# Altium footprint library TIE_2019.PcbLib: 13 footprints
Each footprint in its own frame and in the unit in brackets; x right, y up, seen from the top. Pads: shape width x height; smd on the part's side, far side on the other; paste and mask are expansions set on the pad; w line width, h text height; cw(c..) or ccw(c..) is an arc to the next point about the centre after c.
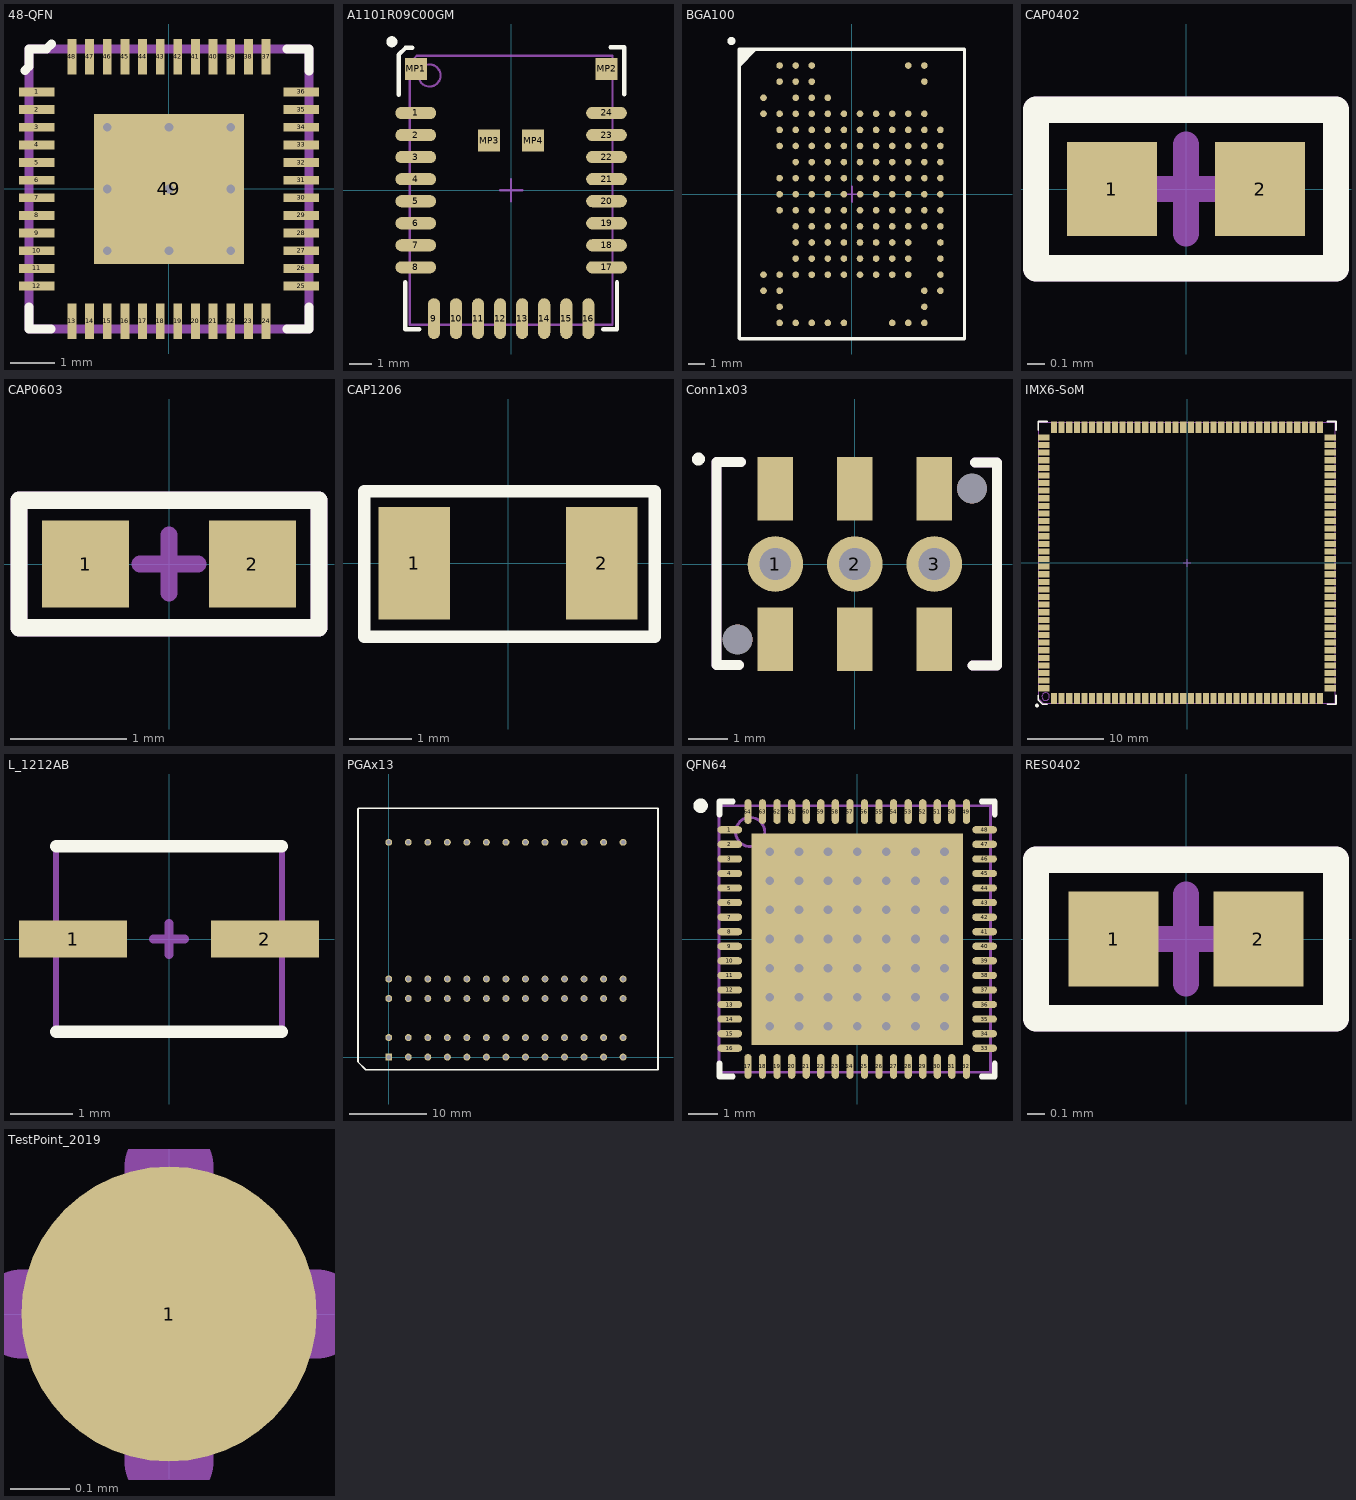
[diagram p0: the footprints below, top view; thin cyan lines are the x and y axes]

## 48-QFN [mm] "6x6mm QFN Package"
pads (49):
  rect 0.8x0.2 smd mask+0.05: 1(-3,2.2) 2(-3,1.8) 3(-3,1.4) 4(-3,1) 5(-3,0.6) 6(-3,0.2) 7(-3,-0.2) 8(-3,-0.6) 9(-3,-1) 10(-3,-1.4) 11(-3,-1.8) 12(-3,-2.2) 25(3,-2.2) 26(3,-1.8) 27(3,-1.4) 28(3,-1) 29(3,-0.6) 30(3,-0.2) 31(3,0.2) 32(3,0.6) 33(3,1) 34(3,1.4) 35(3,1.8) 36(3,2.2)
  rect 0.2x0.8 smd mask+0.05: 13(-2.2,-3) 14(-1.8,-3) 15(-1.4,-3) 16(-1,-3) 17(-0.6,-3) 18(-0.2,-3) 19(0.2,-3) 20(0.6,-3) 21(1,-3) 22(1.4,-3) 23(1.8,-3) 24(2.2,-3) 37(2.2,3) 38(1.8,3) 39(1.4,3) 40(1,3) 41(0.6,3) 42(0.2,3) 43(-0.2,3) 44(-0.6,3) 45(-1,3) 46(-1.4,3) 47(-1.8,3) 48(-2.2,3)
  rect 3.4x3.4 smd paste-10 mask+0.05: 49(0,0)
via 0,0 diameter 0.4 hole 0.2
via -1.4,1.4 diameter 0.4 hole 0.2
via 0,1.4 diameter 0.4 hole 0.2
via 1.4,1.4 diameter 0.4 hole 0.2
via 1.4,0 diameter 0.4 hole 0.2
via -1.4,0 diameter 0.4 hole 0.2
via -1.4,-1.4 diameter 0.4 hole 0.2
via 0,-1.4 diameter 0.4 hole 0.2
via 1.4,-1.4 diameter 0.4 hole 0.2
Top Overlay:
  lines w0.2: -3.261,2.69 -3.175,2.776 -3.175,3.175 -2.776,3.175 -2.661,3.29 ; -3.175,-2.675 -3.175,-3.175 -2.675,-3.175 ; 2.675,-3.175 3.175,-3.175 3.175,-2.675 ; 2.675,3.175 3.175,3.175 3.175,2.675
Top Paste:
  region: 1.55,-0.15 0.15,-0.15 0.15,-1.55 1.55,-1.55
  region: 1.55,1.55 0.15,1.55 0.15,0.15 1.55,0.15
  rectangle: -1.55,0.15 -0.15,1.55
  rectangle: -1.55,-1.55 -0.15,-0.15
Top Assembly:
  text ".Designator" at -2.5,-0.155 h0.5
Mechanical 10:
  lines w0.2: -3.175,-3.175 3.175,-3.175 3.175,3.175 -3.175,3.175 -3.175,-3.175
Mechanical 1(UNUSED):
  lines w0.15: -0.25,0 0.25,0 ; 0,-0.25 0,0.25
3D body "VSC8531XMW-01.stp": height 0.9, standoff 0, extent -3.05,-3.05 3.05,3.05

## A1101R09C00GM [mm] "Sub-GHz Modules 900MHz Radio Only Connector"
height 2.1
pads (28):
  oval 1.85x0.55 smd: 1(-4.325,3.5) 2(-4.325,2.5) 3(-4.325,1.5) 4(-4.325,0.5) 5(-4.325,-0.5) 6(-4.325,-1.5) 7(-4.325,-2.5) 8(-4.325,-3.5) 17(4.325,-3.5) 18(4.325,-2.5) 19(4.325,-1.5) 20(4.325,-0.5) 21(4.325,0.5) 22(4.325,1.5) 23(4.325,2.5) 24(4.325,3.5)
  oval 0.55x1.85 smd: 9(-3.5,-5.825) 10(-2.5,-5.825) 11(-1.5,-5.825) 12(-0.5,-5.825) 13(0.5,-5.825) 14(1.5,-5.825) 15(2.5,-5.825) 16(3.5,-5.825)
  rect 1x1 smd: MP1(-4.325,5.5) MP2(4.325,5.5) MP3(-1,2.25) MP4(1,2.25)
Top Overlay:
  circle w0.25: c-5.41,6.731 r0.125
  lines w0.2: -5.105,4.327 -5.105,6.14 -4.792,6.452 -4.48,6.452 ; -4.8,-4.175 -4.8,-6.3 -4.175,-6.3 ; 4.175,-6.3 4.8,-6.3 4.8,-4.175 ; 4.505,6.478 5.13,6.478 5.13,4.353
Top Component Center:
  lines w0.1: -0.5,0 0.5,0 ; 0,-0.5 0,0.5
Top Assembly:
  circle w0.1: c-3.7,5.2 r0.5
  lines w0.1: -4.6,-6.1 -4.6,5.787 -4.287,6.1 4.6,6.1 4.6,-6.1 -4.6,-6.1
  text ".Designator" at -2.5,-0.155 h0.5
3D body: height 2.1, standoff 0, extent -4.6,-6.1 4.6,6.1

## BGA100 [mm] "BGA, 100-Leads, Body 14.00x18.00mmx1.40mm, Pitch 1.00mm"
height 1.4
pads (142):
  round 0.41 smd: A1(-4.5,8) A2(-3.5,8) A3(-2.5,8) A9(3.5,8) A10(4.5,8) B1(-4.5,7) B2(-3.5,7) B3(-2.5,7) B10(4.5,7) C0(-5.5,6) C2(-3.5,6) C3(-2.5,6) C4(-1.5,6) D0(-5.5,5) D1(-4.5,5) D2(-3.5,5) D3(-2.5,5) D4(-1.5,5) D5(-0.5,5) D6(0.5,5) D7(1.5,5) D8(2.5,5) D9(3.5,5) D10(4.5,5) E1(-4.5,4) E2(-3.5,4) E3(-2.5,4) E4(-1.5,4) E5(-0.5,4) E6(0.5,4) E7(1.5,4) E8(2.5,4) E9(3.5,4) E10(4.5,4) E11(5.5,4) F1(-4.5,3) F2(-3.5,3) F3(-2.5,3) F4(-1.5,3) F5(-0.5,3) F6(0.5,3) F7(1.5,3) F8(2.5,3) F9(3.5,3) F10(4.5,3) F11(5.5,3) G2(-3.5,2) G3(-2.5,2) G4(-1.5,2) G5(-0.5,2) G6(0.5,2) G7(1.5,2) G8(2.5,2) G9(3.5,2) G10(4.5,2) G11(5.5,2) H1(-4.5,1) H2(-3.5,1) H3(-2.5,1) H4(-1.5,1) H5(-0.5,1) H6(0.5,1) H7(1.5,1) H8(2.5,1) H9(3.5,1) H10(4.5,1) H11(5.5,1) J1(-4.5,0) J2(-3.5,0) J3(-2.5,0) J4(-1.5,0) J5(-0.5,0) J6(0.508,0) J7(1.5,0) J8(2.5,0) J9(3.5,0) J10(4.5,0) J11(5.5,0) K1(-4.5,-1) K2(-3.5,-1) K3(-2.5,-1) K4(-1.5,-1) K5(-0.5,-1) K6(0.5,-1) K7(1.5,-1) K8(2.5,-1) K9(3.5,-1) K10(4.5,-1) K11(5.5,-1) L2(-3.5,-2) L3(-2.5,-2) L4(-1.5,-2) L5(-0.5,-2) L6(0.5,-2) L7(1.5,-2) L8(2.5,-2) L9(3.5,-2) L10(4.5,-2) L11(5.5,-2) M2(-3.5,-3) M3(-2.5,-3) M4(-1.5,-3) M5(-0.5,-3) M6(0.5,-3) M7(1.5,-3) M8(2.5,-3) M9(3.5,-3) M11(5.5,-3) N2(-3.5,-4) N3(-2.5,-4) N4(-1.5,-4) N5(-0.5,-4) N6(0.5,-4) N7(1.5,-4) N8(2.5,-4) N9(3.5,-4) N11(5.5,-4) P0(-5.5,-5) P1(-4.5,-5) P2(-3.5,-5) P3(-2.5,-5) P4(-1.5,-5) P5(-0.5,-5) P6(0.5,-5) P7(1.5,-5) P8(2.5,-5) P9(3.5,-5) P11(5.5,-5) R0(-5.5,-6) R1(-4.5,-6) R10(4.5,-6) R11(5.5,-6) T1(-4.5,-7) T10(4.5,-7) U1(-4.5,-8) U2(-3.5,-8) U3(-2.5,-8) U4(-1.5,-8) U5(-0.5,-8) U8(2.5,-8) U9(3.5,-8) U10(4.5,-8)
Top Overlay:
  circle w0.25: c-7.493,9.525 r0.125
  region: -6,9 -7,8 -7,9
  lines w0.2: -7,8 -6,9 ; -7.007,-8.971 -7.007,9.029 6.993,9.029 6.993,-8.971 -7.007,-8.971 ; -7,-9 -7,9 7,9 7,-9 -7,-9
Top Component Center:
  lines w0.1: -0.5,0 0.5,0 ; 0,-0.5 0,0.5
Top Assembly:
  lines w0.1: -7,-9 -7,9 7,9 7,-9 -7,-9
  text ".Designator" at -2.474,-0.13 h0.5
3D body: height 1.4, standoff 0.25, extent -7,-9 7,9

## CAP0402 [mm]
pads (2):
  rect 0.51x0.535 smd mask+0.05: 1(-0.42,0) 2(0.42,0)
Top Overlay:
  lines w0.15: -0.85,-0.45 0.85,-0.45 0.85,0.45 -0.85,0.45 -0.85,-0.45
Top Component Center:
  lines w0.15: -0.25,0 0.25,0 ; 0,-0.25 0,0.25
Top Assembly:
  lines w0.15: -0.85,-0.45 0.85,-0.45 0.85,0.45 -0.85,0.45 -0.85,-0.45
  text ".Designator" at -0.569,-0.257 h0.5
3D body "Ceramic_Capacitor_0402_h20mil.step": height 0.51, standoff 0, extent -0.508,-0.254 0.508,0.254

## CAP0603 [mm]
pads (2):
  rect 0.75x0.75 smd mask+0.05: 1(-0.72,0) 2(0.72,0)
Top Overlay:
  lines w0.15: -1.295,-0.55 -1.295,0.55 1.295,0.55 1.295,-0.55 -1.295,-0.55
Top Component Center:
  lines w0.15: -0.25,0 0.25,0 ; 0,-0.25 0,0.25
Top Assembly:
  lines w0.15: -1.295,-0.55 1.295,-0.55 1.295,0.55 -1.295,0.55 -1.295,-0.55
3D body "Ceramic_Capacitor_0603_h32mil.step": height 0.8, standoff 0, extent -0.8,-0.4 0.8,0.4

## CAP1206 [mm]
pads (2):
  rect 1.15x1.8 smd: 1(-1.5,0) 2(1.5,0)
Top Overlay:
  lines w0.2: -2.3,-1.175 2.35,-1.175 2.35,1.15 -2.3,1.15 -2.3,-1.175
3D body "C1206C104K5RALTU.stp": height 0.88, standoff 0, extent -1.7,-0.9 1.7,0.9

## Conn1x03 [mm]
pads (11):
  round 1.4 hole 0.8: 1(-2,0) 2(0,0) 3(2,0)
  round 0.75 hole 0.75 mask-0.5: ""(-2.95,-1.9) ""(2.95,1.9)
  rect 0.9x1.6 smd mask+0.05: ""(-2,-1.9) ""(-2,1.9) ""(0,-1.9) ""(0,1.9) ""(2,-1.9) ""(2,1.9)
Top Overlay:
  circle w0.254: c-3.937,2.642 r0.036
  lines w0.254: -3.48,-2.54 -2.921,-2.54 -3.48,-2.54 ; -3.48,-2.54 -3.48,2.565 ; -3.48,-2.54 -3.48,2.565 ; -3.48,2.565 -2.87,2.565 -3.48,2.565 ; 3.581,-2.553 3.581,2.553 ; 3.581,-2.553 2.972,-2.553 3.581,-2.553 ; 3.581,-2.553 3.581,2.553 ; 3.581,2.553 3.023,2.553 3.581,2.553
Top Assembly:
  lines w0.254: -2.921,-2.54 -3.48,-2.54 -3.48,2.565 -2.87,2.565 ; 3.581,-2.553 2.972,-2.553 3.581,-2.553 ; 3.581,-2.553 3.581,2.553 ; 3.581,-2.553 3.581,2.553 ; 3.581,2.553 3.023,2.553 3.581,2.553
3D body "c-2315312-1-b-3d.stp": height 5.2, standoff -1.9, extent -3.25,-2.4 3.25,2.4

## IMX6-SoM [mm]
height 3
pads (140):
  rect 0.8x1.5 smd: 1(-17.5,-17.85) 2(-16.5,-17.85) 3(-15.5,-17.85) 4(-14.5,-17.85) 5(-13.5,-17.85) 6(-12.5,-17.85) 7(-11.5,-17.85) 8(-10.5,-17.85) 9(-9.5,-17.85) 10(-8.5,-17.85) 11(-7.5,-17.85) 12(-6.5,-17.85) 13(-5.5,-17.85) 14(-4.5,-17.85) 15(-3.5,-17.85) 16(-2.5,-17.85) 17(-1.5,-17.85) 18(-0.5,-17.85) 19(0.5,-17.85) 20(1.5,-17.85) 21(2.5,-17.85) 22(3.5,-17.85) 23(4.5,-17.85) 24(5.5,-17.85) 25(6.5,-17.85) 26(7.5,-17.85) 27(8.5,-17.85) 28(9.5,-17.85) 29(10.5,-17.85) 30(11.5,-17.85) 31(12.5,-17.85) 32(13.5,-17.85) 33(14.5,-17.85) 34(15.5,-17.85) 35(16.5,-17.85) 36(17.5,-17.85) 71(17.5,17.85) 72(16.5,17.85) 73(15.5,17.85) 74(14.5,17.85) 75(13.5,17.85) 76(12.5,17.85) 77(11.5,17.85) 78(10.5,17.85) 79(9.5,17.85) 80(8.5,17.85) 81(7.5,17.85) 82(6.5,17.85) 83(5.5,17.85) 84(4.5,17.85) 85(3.5,17.85) 86(2.5,17.85) 87(1.5,17.85) 88(0.5,17.85) 89(-0.5,17.85) 90(-1.5,17.85) 91(-2.5,17.85) 92(-3.5,17.85) 93(-4.5,17.85) 94(-5.5,17.85) 95(-6.5,17.85) 96(-7.5,17.85) 97(-8.5,17.85) 98(-9.5,17.85) 99(-10.5,17.85) 100(-11.5,17.85) 101(-12.5,17.85) 102(-13.5,17.85) 103(-14.5,17.85) 104(-15.5,17.85) 105(-16.5,17.85) 106(-17.5,17.85)
  rect 1.5x0.8 smd: 37(18.85,-16.5) 38(18.85,-15.5) 39(18.85,-14.5) 40(18.85,-13.5) 41(18.85,-12.5) 42(18.85,-11.5) 43(18.85,-10.5) 44(18.85,-9.5) 45(18.85,-8.5) 46(18.85,-7.5) 47(18.85,-6.5) 48(18.85,-5.5) 49(18.85,-4.5) 50(18.85,-3.5) 51(18.85,-2.5) 52(18.85,-1.5) 53(18.85,-0.5) 54(18.85,0.5) 55(18.85,1.5) 56(18.85,2.5) 57(18.85,3.5) 58(18.85,4.5) 59(18.85,5.5) 60(18.85,6.5) 61(18.85,7.5) 62(18.85,8.5) 63(18.85,9.5) 64(18.85,10.5) 65(18.85,11.5) 66(18.85,12.5) 67(18.85,13.5) 68(18.85,14.5) 69(18.85,15.5) 70(18.85,16.5) 107(-18.85,16.5) 108(-18.85,15.5) 109(-18.85,14.5) 110(-18.85,13.5) 111(-18.85,12.5) 112(-18.85,11.5) 113(-18.85,10.5) 114(-18.85,9.5) 115(-18.85,8.5) 116(-18.85,7.5) 117(-18.85,6.5) 118(-18.85,5.5) 119(-18.85,4.5) 120(-18.85,3.5) 121(-18.85,2.5) 122(-18.85,1.5) 123(-18.85,0.5) 124(-18.85,-0.5) 125(-18.85,-1.5) 126(-18.85,-2.5) 127(-18.85,-3.5) 128(-18.85,-4.5) 129(-18.85,-5.5) 130(-18.85,-6.5) 131(-18.85,-7.5) 132(-18.85,-8.5) 133(-18.85,-9.5) 134(-18.85,-10.5) 135(-18.85,-11.5) 136(-18.85,-12.5) 137(-18.85,-13.5) 138(-18.85,-14.5) 139(-18.85,-15.5) 140(-18.85,-16.5)
Top Overlay:
  circle w0.25: c-19.75,-18.775 r0.125
  lines w0.2: -19.6,-17.425 -19.6,-18.012 -19.012,-18.6 -18.425,-18.6 ; -19.6,17.425 -19.6,18.6 -18.425,18.6 ; 18.425,-18.6 19.6,-18.6 19.6,-17.425 ; 18.425,18.6 19.6,18.6 19.6,17.425
Top Assembly:
  circle w0.1: c-18.6,-17.6 r0.5
  lines w0.1: -19.5,-17.912 -19.5,18.5 19.5,18.5 19.5,-18.5 -18.912,-18.5 -19.5,-17.912
Mechanical 15:
  lines w0.1: -0.5,0 0.5,0 ; 0,-0.5 0,0.5
3D body: height 3, standoff 0, extent -19.5,-18.5 19.5,18.5

## L_1212AB [mm]
pads (2):
  rect 1.75x0.6 smd: 1(-1.55,0) 2(1.55,0)
Top Overlay:
  lines w0.2: -1.825,-1.5 1.825,-1.5 ; -1.825,1.5 1.825,1.5
Top Component Center:
  lines w0.15: -0.25,0 0.25,0 ; 0,-0.25 0,0.25
Top Assembly:
  lines w0.1: -1.825,-1.5 -1.825,1.5 1.825,1.5 1.825,-1.5 -1.825,-1.5
3D body "IHLP1212ABEV1R0M01.stp": height 2, standoff 0, extent -1.825,-1.449 1.825,1.551

## PGAx13 [mm]
pads (65):
  rect 0.9x0.9 hole 0.6 mask+0.1: A1(0,0)
  round 0.9 hole 0.6 mask+0.1: A2(2.54,0) A3(5.08,0) A4(7.62,0) A5(10.16,0) A6(12.7,0) A7(15.24,0) A8(17.78,0) A9(20.32,0) A10(22.86,0) A11(25.4,0) A12(27.94,0) A13(30.48,0) B1(0,2.54) B2(2.54,2.54) B3(5.08,2.54) B4(7.62,2.54) B5(10.16,2.54) B6(12.7,2.54) B7(15.24,2.54) B8(17.78,2.54) B9(20.32,2.54) B10(22.86,2.54) B11(25.4,2.54) B12(27.94,2.54) B13(30.48,2.54) D1(0,7.62) D2(2.54,7.62) D3(5.08,7.62) D4(7.62,7.62) D5(10.16,7.62) D6(12.7,7.62) D7(15.24,7.62) D8(17.78,7.62) D9(20.32,7.62) D10(22.86,7.62) D11(25.4,7.62) D12(27.94,7.62) D13(30.48,7.62) E1(0,10.16) E2(2.54,10.16) E3(5.08,10.16) E4(7.62,10.16) E5(10.16,10.16) E6(12.7,10.16) E7(15.24,10.16) E8(17.78,10.16) E9(20.32,10.16) E10(22.86,10.16) E11(25.4,10.16) E12(27.94,10.16) E13(30.48,10.16) M1(0,27.94) M2(2.54,27.94) M3(5.08,27.94) M4(7.62,27.94) M5(10.16,27.94) M6(12.7,27.94) M7(15.24,27.94) M8(17.78,27.94) M9(20.32,27.94) M10(22.86,27.94) M11(25.4,27.94) M12(27.94,27.94) M13(30.48,27.94)
Top Overlay:
  lines w0.2: -4,32.3 -4,-0.623 -2.983,-1.64 35.02,-1.64 35.02,32.36 -3.98,32.36
Top Assembly:
  text ".Designator" at -2.5,-0.155 h0.5

## QFN64 [mm] "QFN, 64-Leads, Body 9.00x9.00mm, Pitch 0.50mm, Thermal Pad 7.25x7.25mm, IPC Medium Density"
height 0.8
pads (65):
  oval 0.85x0.25 smd mask+0.07: 1(-4.375,3.75) 2(-4.375,3.25) 3(-4.375,2.75) 4(-4.375,2.25) 5(-4.375,1.75) 6(-4.375,1.25) 7(-4.375,0.75) 8(-4.375,0.25) 9(-4.375,-0.25) 10(-4.375,-0.75) 11(-4.375,-1.25) 12(-4.375,-1.75) 13(-4.375,-2.25) 14(-4.375,-2.75) 15(-4.375,-3.25) 16(-4.375,-3.75) 33(4.375,-3.75) 34(4.375,-3.25) 35(4.375,-2.75) 36(4.375,-2.25) 37(4.375,-1.75) 38(4.375,-1.25) 39(4.375,-0.75) 40(4.375,-0.25) 41(4.375,0.25) 42(4.375,0.75) 43(4.375,1.25) 44(4.375,1.75) 45(4.375,2.25) 46(4.375,2.75) 47(4.375,3.25) 48(4.375,3.75)
  oval 0.25x0.85 smd mask+0.07: 17(-3.75,-4.375) 18(-3.25,-4.375) 19(-2.75,-4.375) 20(-2.25,-4.375) 21(-1.75,-4.375) 22(-1.25,-4.375) 23(-0.75,-4.375) 24(-0.25,-4.375) 25(0.25,-4.375) 26(0.75,-4.375) 27(1.25,-4.375) 28(1.75,-4.375) 29(2.25,-4.375) 30(2.75,-4.375) 31(3.25,-4.375) 32(3.75,-4.375) 49(3.75,4.375) 50(3.25,4.375) 51(2.75,4.375) 52(2.25,4.375) 53(1.75,4.375) 54(1.25,4.375) 55(0.75,4.375) 56(0.25,4.375) 57(-0.25,4.375) 58(-0.75,4.375) 59(-1.25,4.375) 60(-1.75,4.375) 61(-2.25,4.375) 62(-2.75,4.375) 63(-3.25,4.375) 64(-3.75,4.375)
  rect 7.25x7.25 smd paste+0 mask+0.07: ""(-0.001,-0.007)
via -1,-3 diameter 0.6 hole 0.3
via -2,-3 diameter 0.6 hole 0.3
via -3,-3 diameter 0.6 hole 0.3
via -1,-2 diameter 0.6 hole 0.3
via -2,-2 diameter 0.6 hole 0.3
via -3,-2 diameter 0.6 hole 0.3
via -3,-1 diameter 0.6 hole 0.3
via -2,-1 diameter 0.6 hole 0.3
via -1,-1 diameter 0.6 hole 0.3
via -3,0 diameter 0.6 hole 0.3
via -2,0 diameter 0.6 hole 0.3
via -1,0 diameter 0.6 hole 0.3
via -3,1 diameter 0.6 hole 0.3
via -2,1 diameter 0.6 hole 0.3
via -1,1 diameter 0.6 hole 0.3
via 3,1 diameter 0.6 hole 0.3
via 2,1 diameter 0.6 hole 0.3
via 1,1 diameter 0.6 hole 0.3
via 3,0 diameter 0.6 hole 0.3
via 2,0 diameter 0.6 hole 0.3
via 1,0 diameter 0.6 hole 0.3
via 3,-1 diameter 0.6 hole 0.3
via 2,-1 diameter 0.6 hole 0.3
via 1,-1 diameter 0.6 hole 0.3
via 3,-2 diameter 0.6 hole 0.3
via 2,-2 diameter 0.6 hole 0.3
via 1,-2 diameter 0.6 hole 0.3
via 3,-3 diameter 0.6 hole 0.3
via 2,-3 diameter 0.6 hole 0.3
via 1,-3 diameter 0.6 hole 0.3
via 0,-3 diameter 0.6 hole 0.3
via 0,-2 diameter 0.6 hole 0.3
via 0,-1 diameter 0.6 hole 0.3
via -3,3 diameter 0.6 hole 0.3
via -2,3 diameter 0.6 hole 0.3
via -1,3 diameter 0.6 hole 0.3
via -3,2 diameter 0.6 hole 0.3
via -2,2 diameter 0.6 hole 0.3
via -1,2 diameter 0.6 hole 0.3
via 3,2 diameter 0.6 hole 0.3
via 2,2 diameter 0.6 hole 0.3
via 1,2 diameter 0.6 hole 0.3
via 3,3 diameter 0.6 hole 0.3
via 2,3 diameter 0.6 hole 0.3
via 1,3 diameter 0.6 hole 0.3
via 0,3 diameter 0.6 hole 0.3
via 0,2 diameter 0.6 hole 0.3
via 0,1 diameter 0.6 hole 0.3
via 0,0 diameter 0.6 hole 0.3
Top Overlay:
  circle w0.25: c-5.375,4.575 r0.125
  lines w0.2: -4.725,-4.275 -4.725,-4.725 -4.275,-4.725 ; -4.725,4.275 -4.725,4.725 -4.275,4.725 ; 4.275,-4.725 4.725,-4.725 4.725,-4.275 ; 4.275,4.725 4.725,4.725 4.725,4.275
Top Assembly:
  circle w0.1: c-3.675,3.675 r0.5
  lines w0.1: -4.738,-4.575 -4.738,4.575 4.575,4.575 4.575,-4.575 -4.738,-4.575
  text ".Designator" at -2.5,-0.162 h0.5
3D body: height 0.8, standoff 0.08, extent -4.575,-4.575 4.575,4.575

## RES0402 [mm]
pads (2):
  rect 0.51x0.54 smd mask+0.05: 1(-0.41,0) 2(0.41,0)
Top Overlay:
  lines w0.15: -0.85,-0.45 0.85,-0.45 0.85,0.45 -0.85,0.45 -0.85,-0.45
Top Component Center:
  lines w0.15: -0.25,0 0.25,0 ; 0,-0.25 0,0.25
Top Assembly:
  lines w0.15: -0.85,-0.45 -0.85,0.45 0.85,0.45 0.85,-0.45 -0.85,-0.45
3D body "User Library-CR1005-0402.STEP": height 0.35, standoff 0, extent -0.5,-0.25 0.5,0.25

## TestPoint_2019 [mm]
pads (1):
  round 0.5 smd paste-10 mask+0.1: 1(0,0)
Mechanical 1(UNUSED):
  lines w0.15: -0.25,0 0.25,0 ; 0,-0.25 0,0.25